# Altium schematic symbol library SCH - POWER - SUPPLY - TDK100-24S24W.SchLib: 1 symbol
Pins are listed as number, name and electrical type; pins without a type are passive.

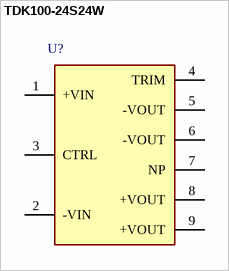
[diagram p0: symbol TDK100-24S24W]

## TDK100-24S24W
designator U?
pins: 1 +VIN (power), 2 -VIN (power), 3 CTRL, 4 TRIM (power), 5 -VOUT, 6 -VOUT (power), 7 NP (power), 8 +VOUT (power), 9 +VOUT (power)